# Altium footprint library FootPrintLib_10.PcbLib: 270 footprints (part 7 of 17)
Each footprint in its own frame and in the unit in brackets; x right, y up, seen from the top. Pads: shape width x height; smd on the part's side, far side on the other; paste and mask are expansions set on the pad; w line width, h text height; cw(c..) or ccw(c..) is an arc to the next point about the centre after c.
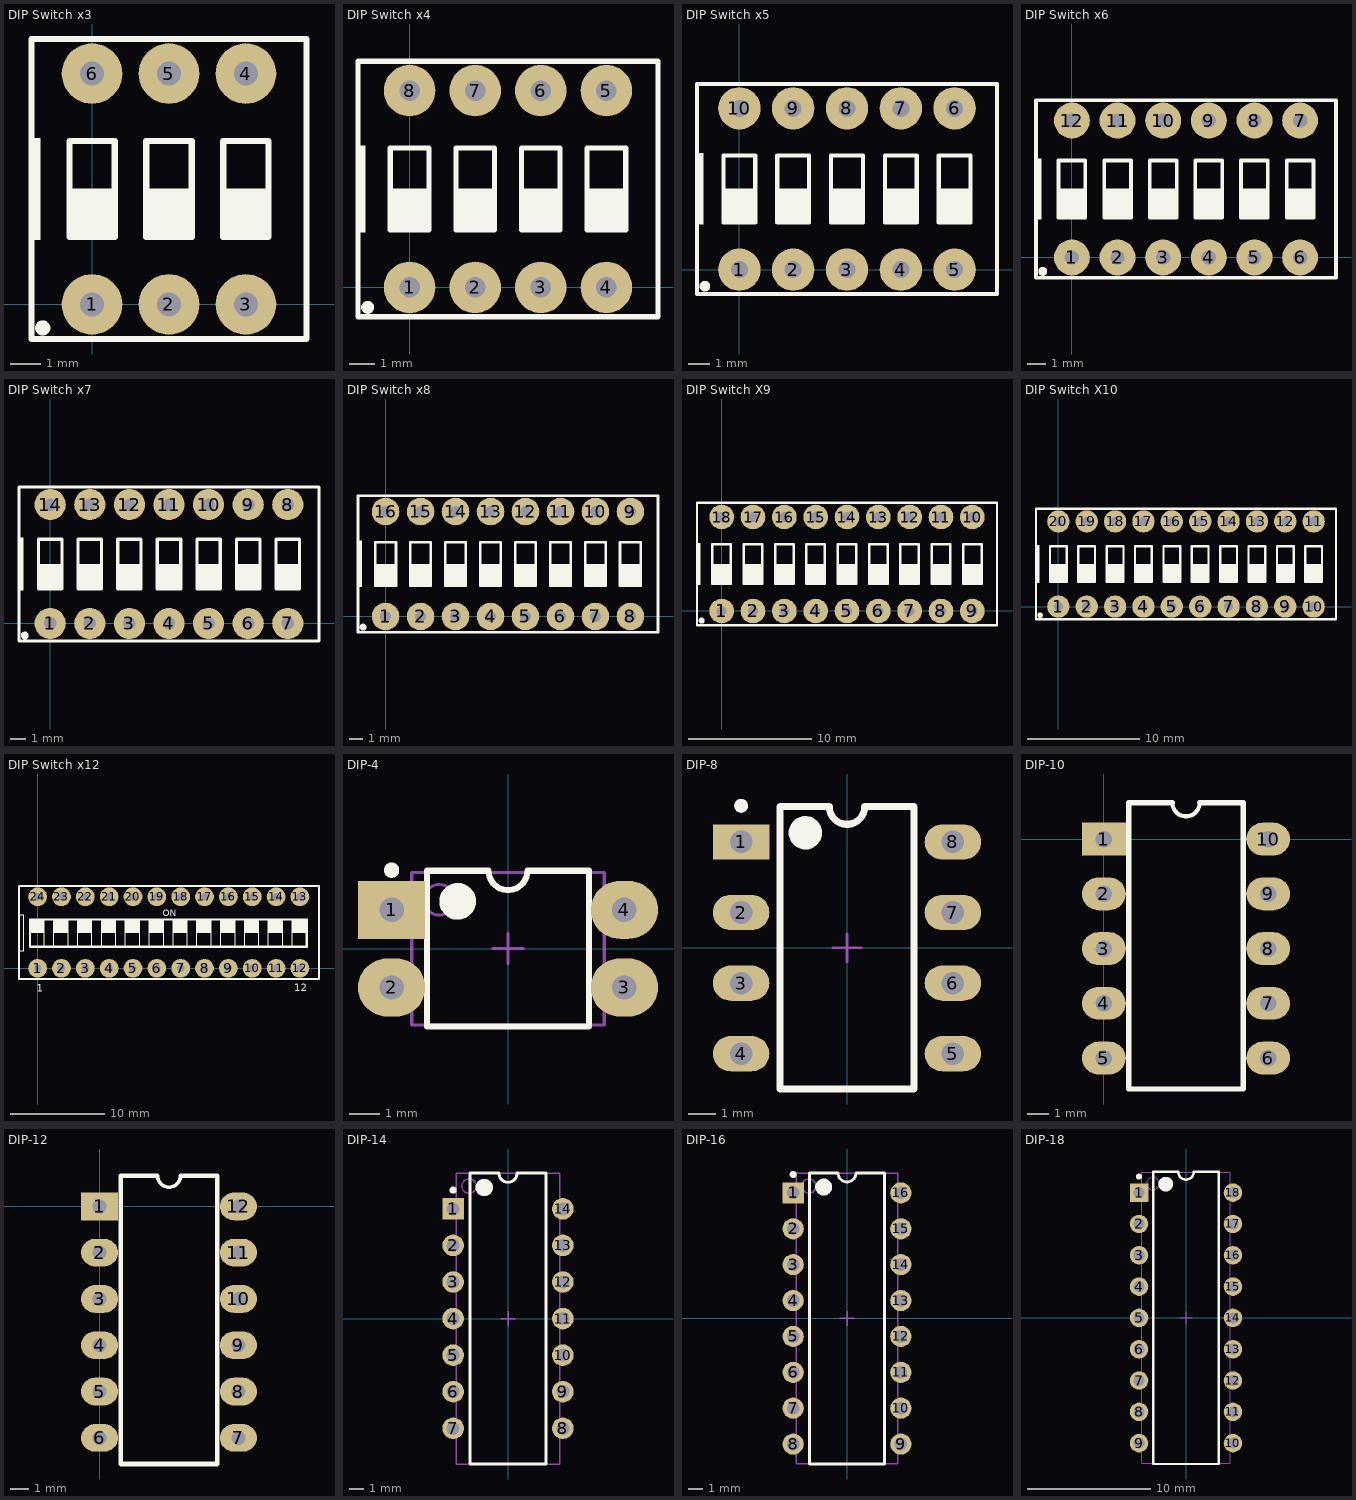
[diagram p6: the footprints below, top view; thin cyan lines are the x and y axes]

## DIP Switch x3 [mm] "Switch DIP 3 way flat slide Thru-Hole"
height 7
pads (6):
  round 2 hole 0.8: 1(0,0) 2(2.54,0) 3(5.08,0) 4(5.08,7.62) 5(2.54,7.62) 6(0,7.62)
Top Overlay:
  circle w0.25: c-1.625,-0.775 r0.125
  rectangle: -0.75,2.225 0.75,3.825
  rectangle: 1.79,2.225 3.29,3.825
  rectangle: 4.33,2.225 5.83,3.825
  rectangle: -2,2.125 -1.7,5.5
  lines w0.2: -2,-1.14 7.08,-1.14 7.08,8.76 -2,8.76 -2,-1.14 ; -0.75,2.225 -0.75,5.395 0.75,5.395 0.75,2.225 -0.75,2.225 ; 1.79,2.225 3.29,2.225 3.29,5.395 1.79,5.395 1.79,2.225 ; 4.33,2.225 5.83,2.225 5.83,5.395 4.33,5.395 4.33,2.225
3D body "User Library-DS1040-03 (DIP_switch).STEP": height 6.8, standoff -3.85, extent -2,-1.14 7.08,8.76

## DIP Switch x4 [mm] "Switch DIP 4 way flat slide Thru-Hole"
height 7
pads (8):
  round 2 hole 0.8: 1(0,0) 2(2.54,0) 3(5.08,0) 4(7.62,0) 5(7.62,7.62) 6(5.08,7.62) 7(2.54,7.62) 8(0,7.62)
Top Overlay:
  circle w0.25: c-1.625,-0.775 r0.125
  rectangle: -0.75,2.225 0.75,3.825
  rectangle: 1.79,2.225 3.29,3.825
  rectangle: 4.33,2.225 5.83,3.825
  rectangle: 6.87,2.225 8.37,3.825
  rectangle: -2,2.125 -1.7,5.5
  lines w0.2: -2,-1.14 9.62,-1.14 9.62,8.76 -2,8.76 -2,-1.14 ; -0.75,2.225 -0.75,5.395 0.75,5.395 0.75,2.225 -0.75,2.225 ; 1.79,2.225 3.29,2.225 3.29,5.395 1.79,5.395 1.79,2.225 ; 4.33,2.225 5.83,2.225 5.83,5.395 4.33,5.395 4.33,2.225 ; 6.87,2.225 8.37,2.225 8.37,5.395 6.87,5.395 6.87,2.225
3D body "User Library-DS1040-04 (DIP_switch).STEP": height 6.8, standoff -3.85, extent -2,-1.14 9.62,8.76

## DIP Switch x5 [mm] "Switch DIP 5 way flat slide Thru-Hole"
height 7
pads (10):
  round 2 hole 0.8: 1(0,0) 2(2.54,0) 3(5.08,0) 4(7.62,0) 5(10.16,0) 6(10.16,7.62) 7(7.62,7.62) 8(5.08,7.62) 9(2.54,7.62) 10(0,7.62)
Top Overlay:
  circle w0.25: c-1.625,-0.775 r0.125
  rectangle: -0.75,2.225 0.75,3.825
  rectangle: 1.79,2.225 3.29,3.825
  rectangle: 4.33,2.225 5.83,3.825
  rectangle: 6.87,2.225 8.37,3.825
  rectangle: 9.41,2.225 10.91,3.825
  rectangle: -2,2.125 -1.7,5.5
  lines w0.2: -2,-1.14 12.16,-1.14 12.16,8.76 -2,8.76 -2,-1.14 ; -0.75,2.225 -0.75,5.395 0.75,5.395 0.75,2.225 -0.75,2.225 ; 1.79,2.225 3.29,2.225 3.29,5.395 1.79,5.395 1.79,2.225 ; 4.33,2.225 5.83,2.225 5.83,5.395 4.33,5.395 4.33,2.225 ; 6.87,2.225 8.37,2.225 8.37,5.395 6.87,5.395 6.87,2.225 ; 9.41,2.225 10.91,2.225 10.91,5.395 9.41,5.395 9.41,2.225
3D body "User Library-DS1040-05 (DIP_switch).STEP": height 6.8, standoff -3.85, extent -2,-1.14 12.16,8.76

## DIP Switch x6 [mm] "Switch DIP 6 way flat slide Thru-Hole"
height 7
pads (12):
  round 2 hole 0.8: 1(0,0) 2(2.54,0) 3(5.08,0) 4(7.62,0) 5(10.16,0) 6(12.7,0) 7(12.7,7.62) 8(10.16,7.62) 9(7.62,7.62) 10(5.08,7.62) 11(2.54,7.62) 12(0,7.62)
Top Overlay:
  circle w0.25: c-1.625,-0.775 r0.125
  rectangle: -0.75,2.225 0.75,3.825
  rectangle: 1.79,2.225 3.29,3.825
  rectangle: 4.33,2.225 5.83,3.825
  rectangle: 6.87,2.225 8.37,3.825
  rectangle: 9.41,2.225 10.91,3.825
  rectangle: 11.95,2.225 13.45,3.825
  rectangle: -2,2.125 -1.7,5.5
  lines w0.2: -2,-1.14 14.7,-1.14 14.7,8.76 -2,8.76 -2,-1.14 ; -0.75,2.225 -0.75,5.395 0.75,5.395 0.75,2.225 -0.75,2.225 ; 1.79,2.225 3.29,2.225 3.29,5.395 1.79,5.395 1.79,2.225 ; 4.33,2.225 5.83,2.225 5.83,5.395 4.33,5.395 4.33,2.225 ; 6.87,2.225 8.37,2.225 8.37,5.395 6.87,5.395 6.87,2.225 ; 9.41,2.225 10.91,2.225 10.91,5.395 9.41,5.395 9.41,2.225 ; 11.95,2.225 13.45,2.225 13.45,5.395 11.95,5.395 11.95,2.225
3D body "User Library-DS1040-06 (DIP_switch).STEP": height 6.8, standoff -3.85, extent -2,-1.14 14.7,8.76

## DIP Switch x7 [mm] "Switch DIP 7 way flat slide Thru-Hole"
height 7
pads (14):
  round 2 hole 0.8: 1(0,0) 2(2.54,0) 3(5.08,0) 4(7.62,0) 5(10.16,0) 6(12.7,0) 7(15.24,0) 8(15.24,7.62) 9(12.7,7.62) 10(10.16,7.62) 11(7.62,7.62) 12(5.08,7.62) 13(2.54,7.62) 14(0,7.62)
Top Overlay:
  circle w0.25: c-1.625,-0.775 r0.125
  rectangle: -0.75,2.225 0.75,3.825
  rectangle: 1.79,2.225 3.29,3.825
  rectangle: 4.33,2.225 5.83,3.825
  rectangle: 6.87,2.225 8.37,3.825
  rectangle: 9.41,2.225 10.91,3.825
  rectangle: 11.95,2.225 13.45,3.825
  rectangle: 14.49,2.225 15.99,3.825
  rectangle: -2,2.125 -1.7,5.5
  lines w0.2: -2,-1.14 17.24,-1.14 17.24,8.76 -2,8.76 -2,-1.14 ; -0.75,2.225 -0.75,5.395 0.75,5.395 0.75,2.225 -0.75,2.225 ; 1.79,2.225 3.29,2.225 3.29,5.395 1.79,5.395 1.79,2.225 ; 4.33,2.225 5.83,2.225 5.83,5.395 4.33,5.395 4.33,2.225 ; 6.87,2.225 8.37,2.225 8.37,5.395 6.87,5.395 6.87,2.225 ; 9.41,2.225 10.91,2.225 10.91,5.395 9.41,5.395 9.41,2.225 ; 11.95,2.225 13.45,2.225 13.45,5.395 11.95,5.395 11.95,2.225 ; 14.49,2.225 15.99,2.225 15.99,5.395 14.49,5.395 14.49,2.225
3D body "User Library-DS1040-07 (DIP_switch).STEP": height 6.8, standoff -3.85, extent -2,-1.14 17.24,8.76

## DIP Switch x8 [mm] "Switch DIP 8 way flat slide Thru-Hole"
height 7
pads (16):
  round 2 hole 0.8: 1(0,0) 2(2.54,0) 3(5.08,0) 4(7.62,0) 5(10.16,0) 6(12.7,0) 7(15.24,0) 8(17.78,0) 9(17.78,7.62) 10(15.24,7.62) 11(12.7,7.62) 12(10.16,7.62) 13(7.62,7.62) 14(5.08,7.62) 15(2.54,7.62) 16(0,7.62)
Top Overlay:
  circle w0.25: c-1.625,-0.775 r0.125
  rectangle: -0.75,2.225 0.75,3.825
  rectangle: 1.79,2.225 3.29,3.825
  rectangle: 4.33,2.225 5.83,3.825
  rectangle: 6.87,2.225 8.37,3.825
  rectangle: 9.41,2.225 10.91,3.825
  rectangle: 11.95,2.225 13.45,3.825
  rectangle: 14.49,2.225 15.99,3.825
  rectangle: 17.03,2.225 18.53,3.825
  rectangle: -2,2.125 -1.7,5.5
  lines w0.2: -2,-1.14 19.78,-1.14 19.78,8.76 -2,8.76 -2,-1.14 ; -0.75,2.225 -0.75,5.395 0.75,5.395 0.75,2.225 -0.75,2.225 ; 1.79,2.225 3.29,2.225 3.29,5.395 1.79,5.395 1.79,2.225 ; 4.33,2.225 5.83,2.225 5.83,5.395 4.33,5.395 4.33,2.225 ; 6.87,2.225 8.37,2.225 8.37,5.395 6.87,5.395 6.87,2.225 ; 9.41,2.225 10.91,2.225 10.91,5.395 9.41,5.395 9.41,2.225 ; 11.95,2.225 13.45,2.225 13.45,5.395 11.95,5.395 11.95,2.225 ; 14.49,2.225 15.99,2.225 15.99,5.395 14.49,5.395 14.49,2.225 ; 17.03,2.225 18.53,2.225 18.53,5.395 17.03,5.395 17.03,2.225
3D body "User Library-DS1040-08 (DIP_switch).STEP": height 6.8, standoff -3.85, extent -2,-1.14 19.78,8.76

## DIP Switch X9 [mm] "Switch DIP 9 way flat slide Thru-Hole"
height 7
pads (18):
  round 2 hole 0.8: 1(0,0) 2(2.54,0) 3(5.08,0) 4(7.62,0) 5(10.16,0) 6(12.7,0) 7(15.24,0) 8(17.78,0) 9(20.32,0) 10(20.32,7.62) 11(17.78,7.62) 12(15.24,7.62) 13(12.7,7.62) 14(10.16,7.62) 15(7.62,7.62) 16(5.08,7.62) 17(2.54,7.62) 18(0,7.62)
Top Overlay:
  circle w0.25: c-1.625,-0.775 r0.125
  rectangle: -2,2.125 -1.7,5.5
  rectangle: 19.57,2.225 21.07,3.825
  rectangle: 17.03,2.225 18.53,3.825
  rectangle: 14.49,2.225 15.99,3.825
  rectangle: 11.95,2.225 13.45,3.825
  rectangle: 9.41,2.225 10.91,3.825
  rectangle: 6.87,2.225 8.37,3.825
  rectangle: 4.33,2.225 5.83,3.825
  rectangle: 1.79,2.225 3.29,3.825
  rectangle: -0.75,2.225 0.75,3.825
  lines w0.2: -2,-1.14 -2,8.76 22.32,8.76 22.32,-1.14 -2,-1.14 ; -0.75,2.225 0.75,2.225 0.75,5.395 -0.75,5.395 -0.75,2.225 ; 1.79,2.225 1.79,5.395 3.29,5.395 3.29,2.225 1.79,2.225 ; 4.33,2.225 4.33,5.395 5.83,5.395 5.83,2.225 4.33,2.225 ; 6.87,2.225 6.87,5.395 8.37,5.395 8.37,2.225 6.87,2.225 ; 9.41,2.225 9.41,5.395 10.91,5.395 10.91,2.225 9.41,2.225 ; 11.95,2.225 11.95,5.395 13.45,5.395 13.45,2.225 11.95,2.225 ; 14.49,2.225 14.49,5.395 15.99,5.395 15.99,2.225 14.49,2.225 ; 17.03,2.225 17.03,5.395 18.53,5.395 18.53,2.225 17.03,2.225 ; 19.57,2.225 19.57,5.395 21.07,5.395 21.07,2.225 19.57,2.225
3D body "User Library-DS1040-09 (DIP_switch).STEP": height 6.8, standoff -3.85, extent -2,-1.14 22.32,8.76

## DIP Switch X10 [mm] "Switch DIP 10 way flat slide Thru-Hole"
height 7
pads (20):
  round 2 hole 0.8: 1(0,0) 2(2.54,0) 3(5.08,0) 4(7.62,0) 5(10.16,0) 6(12.7,0) 7(15.24,0) 8(17.78,0) 9(20.32,0) 10(22.86,0) 11(22.86,7.62) 12(20.32,7.62) 13(17.78,7.62) 14(15.24,7.62) 15(12.7,7.62) 16(10.16,7.62) 17(7.62,7.62) 18(5.08,7.62) 19(2.54,7.62) 20(0,7.62)
Top Overlay:
  circle w0.25: c-1.625,-0.775 r0.125
  rectangle: -2,2.125 -1.7,5.5
  rectangle: 22.11,2.225 23.61,3.825
  rectangle: 19.57,2.225 21.07,3.825
  rectangle: 17.03,2.225 18.53,3.825
  rectangle: 14.49,2.225 15.99,3.825
  rectangle: 11.95,2.225 13.45,3.825
  rectangle: 9.41,2.225 10.91,3.825
  rectangle: 6.87,2.225 8.37,3.825
  rectangle: 4.33,2.225 5.83,3.825
  rectangle: 1.79,2.225 3.29,3.825
  rectangle: -0.75,2.225 0.75,3.825
  lines w0.2: -2,-1.14 -2,8.76 24.86,8.76 24.86,-1.14 -2,-1.14 ; -0.75,2.225 0.75,2.225 0.75,5.395 -0.75,5.395 -0.75,2.225 ; 1.79,2.225 1.79,5.395 3.29,5.395 3.29,2.225 1.79,2.225 ; 4.33,2.225 4.33,5.395 5.83,5.395 5.83,2.225 4.33,2.225 ; 6.87,2.225 6.87,5.395 8.37,5.395 8.37,2.225 6.87,2.225 ; 9.41,2.225 9.41,5.395 10.91,5.395 10.91,2.225 9.41,2.225 ; 11.95,2.225 11.95,5.395 13.45,5.395 13.45,2.225 11.95,2.225 ; 14.49,2.225 14.49,5.395 15.99,5.395 15.99,2.225 14.49,2.225 ; 17.03,2.225 17.03,5.395 18.53,5.395 18.53,2.225 17.03,2.225 ; 19.57,2.225 19.57,5.395 21.07,5.395 21.07,2.225 19.57,2.225 ; 22.11,2.225 22.11,5.395 23.61,5.395 23.61,2.225 22.11,2.225
3D body "User Library-DS1040-10 (DIP_switch).STEP": height 6.8, standoff -3.85, extent -2,-1.14 24.86,8.76

## DIP Switch x12 [mm] "Switch DIP 12 way flat slide Thru-Hole"
pads (24):
  round 2 hole 0.8: 1(0,0) 2(2.54,0) 3(5.08,0) 4(7.62,0) 5(10.16,0) 6(12.7,0) 7(15.24,0) 8(17.78,0) 9(20.32,0) 10(22.86,0) 11(25.4,0) 12(27.94,0) 13(27.94,7.62) 14(25.4,7.62) 15(22.86,7.62) 16(20.32,7.62) 17(17.78,7.62) 18(15.24,7.62) 19(12.7,7.62) 20(10.16,7.62) 21(7.62,7.62) 22(5.08,7.62) 23(2.54,7.62) 24(0,7.62)
Top Overlay:
  region: 28.652,3.752 28.652,5.198 27.128,5.198 27.128,3.752
  region: 26.112,3.752 26.112,5.198 24.588,5.198 24.588,3.752
  region: 23.572,3.752 23.572,5.198 22.048,5.198 22.048,3.752
  region: 21.032,3.752 21.032,5.198 19.508,5.198 19.508,3.752
  region: 18.492,3.752 18.492,5.198 16.968,5.198 16.968,3.752
  region: 15.952,3.752 15.952,5.198 14.428,5.198 14.428,3.752
  region: 13.412,3.752 13.412,5.198 11.888,5.198 11.888,3.752
  region: 10.872,3.752 10.872,5.198 9.348,5.198 9.348,3.752
  region: 8.332,3.752 8.332,5.198 6.808,5.198 6.808,3.752
  region: 5.792,3.752 5.792,5.198 4.268,5.198 4.268,3.752
  region: 3.252,3.752 3.252,5.198 1.728,5.198 1.728,3.752
  region: 0.712,3.752 0.712,5.198 -0.812,5.198 -0.812,3.752
  lines w0.1: -0.812,2.307 -0.812,5.198 ; 0.712,2.307 0.712,5.198 ; 1.728,2.307 1.728,5.198 ; 3.252,2.307 3.252,5.198 ; 4.268,2.307 4.268,5.198 ; 5.792,2.307 5.792,5.198 ; 6.808,2.307 6.808,5.198 ; 8.332,2.307 8.332,5.198 ; 9.348,2.307 9.348,5.198 ; 10.872,2.307 10.872,5.198 ; 11.888,2.307 11.888,5.198 ; 13.412,2.307 13.412,5.198 ; 14.428,2.307 14.428,5.198 ; 15.952,2.307 15.952,5.198 ; 16.968,2.307 16.968,5.198 ; 18.492,2.307 18.492,5.198 ; 19.508,2.307 19.508,5.198 ; 21.032,2.307 21.032,5.198 ; 22.048,2.307 22.048,5.198 ; 23.572,2.307 23.572,5.198 ; 24.588,2.307 24.588,5.198 ; 26.112,2.307 26.112,5.198 ; 27.128,2.307 27.128,5.198
  lines w0.127: -1.981,1.9 -1.473,1.9 -1.473,5.71 -1.981,5.71
  lines w0.2: -1.981,-1.143 -1.981,8.763 29.972,8.763 29.972,-1.143 -1.981,-1.143
  lines w0.254: -0.812,2.307 28.652,2.307 28.652,5.198 -0.812,5.198 -0.812,2.307
  text "ON" at 13.34,5.55 h0.7
  text "12" at 27.36,-2.43 h0.76
  text "1" at -0.08,-2.51 h0.76
Mechanical 1:
  circle w0.025: c17.78,0 r0.254
  circle w0.025: c17.78,7.62 r0.254
  circle w0.025: c15.24,0 r0.254
  circle w0.025: c12.7,0 r0.254
  circle w0.025: c12.7,7.62 r0.254
  circle w0.025: c10.16,7.62 r0.254
  circle w0.025: c10.16,0 r0.254
  circle w0.025: c0,0 r0.254
  circle w0.025: c2.54,-0.01 r0.254
  circle w0.025: c5.08,0 r0.254
  circle w0.025: c7.62,0 r0.254
  circle w0.025: c7.62,7.62 r0.254
  circle w0.025: c5.08,7.62 r0.254
  circle w0.025: c2.54,7.62 r0.254
  circle w0.025: c0,7.62 r0.254
3D body: height 0.76, standoff 0, extent 20.067,7.367 20.573,7.873
3D body: height 0.76, standoff 0, extent 22.607,7.367 23.113,7.873
3D body: height 0.76, standoff 0, extent 25.147,7.367 25.653,7.873
3D body: height 0.76, standoff 0, extent 27.687,7.367 28.193,7.873
3D body: height 0.76, standoff 0, extent 27.687,-0.253 28.193,0.253
3D body: height 0.76, standoff 0, extent 25.147,-0.253 25.653,0.253
3D body: height 0.76, standoff 0, extent 22.607,-0.253 23.113,0.253
3D body: height 0.76, standoff 0, extent 20.067,-0.253 20.573,0.253
3D body: height 0.76, standoff 0, extent 17.527,-0.253 18.033,0.253
3D body: height 0.76, standoff 0, extent 14.987,-0.253 15.493,0.253
3D body: height 0.76, standoff 0, extent 12.447,-0.253 12.953,0.253
3D body: height 0.76, standoff 0, extent 9.907,-0.253 10.413,0.253
3D body: height 0.76, standoff 0, extent 12.447,7.367 12.953,7.873
3D body: height 0.76, standoff 0, extent 17.527,7.367 18.033,7.873
3D body: height 0.76, standoff 0, extent 14.987,7.367 15.493,7.873
3D body: height 6.35, standoff 0.25, extent 27.128,4.487 28.652,5.198
3D body: height 0.76, standoff 0, extent -0.253,7.367 0.253,7.873
3D body: height 0.76, standoff 0, extent 2.287,7.367 2.793,7.873
3D body: height 0.76, standoff 0, extent 4.827,7.367 5.333,7.873
3D body: height 0.76, standoff 0, extent 7.367,7.367 7.873,7.873
3D body: height 0.76, standoff 0, extent -0.253,-0.253 0.253,0.253
3D body: height 0.76, standoff 0, extent 2.287,-0.263 2.793,0.243
3D body: height 0.76, standoff 0, extent 4.827,-0.253 5.333,0.253
3D body: height 0.76, standoff 0, extent 7.367,-0.253 7.873,0.253
3D body: height 3.81, standoff 0, extent -1.981,1.9 -1.473,5.71
3D body: height 5.59, standoff 0, extent -1.981,-1.143 29.972,8.763
3D body: height 0.25, standoff 0.05, extent -1.981,-1.143 29.972,8.763
3D body: height 5.08, standoff 0.25, extent 27.128,2.307 28.652,4.487
3D body: height 5.08, standoff 0.25, extent 22.048,2.307 23.572,4.487
3D body: height 6.35, standoff 0.25, extent 22.048,4.487 23.572,5.198
3D body: height 5.08, standoff 0.25, extent 19.508,2.307 21.032,4.487
3D body: height 6.35, standoff 0.25, extent 19.508,4.487 21.032,5.198
3D body: height 5.59, standoff 0, extent -1.473,2.362 -0.762,5.253
3D body: height 5.59, standoff 0, extent 26.112,2.307 27.128,5.198
3D body: height 5.59, standoff 0, extent 21.032,2.307 22.048,5.198
3D body: height 5.59, standoff 0, extent 23.572,2.307 24.588,5.198
3D body: height 5.08, standoff 0.25, extent 24.588,2.307 26.112,4.487
3D body: height 6.35, standoff 0.25, extent 24.588,4.487 26.112,5.198
3D body: height 6.35, standoff 0.25, extent 16.968,4.487 18.492,5.198
3D body: height 5.08, standoff 0.25, extent 16.968,2.307 18.492,4.487
3D body: height 5.59, standoff 0, extent 18.492,2.307 19.508,5.198
3D body: height 6.35, standoff 0.25, extent 14.428,4.487 15.952,5.198
3D body: height 5.08, standoff 0.25, extent 14.428,2.307 15.952,4.487
3D body: height 5.59, standoff 0, extent 15.952,2.307 16.968,5.198
3D body: height 6.35, standoff 0.25, extent 11.888,4.487 13.412,5.198
3D body: height 5.08, standoff 0.25, extent 11.888,2.307 13.412,4.487
3D body: height 5.59, standoff 0, extent 13.412,2.307 14.428,5.198
3D body: height 6.35, standoff 0.25, extent 9.348,4.487 10.872,5.198
3D body: height 5.08, standoff 0.25, extent 9.348,2.307 10.872,4.487
3D body: height 5.59, standoff 0, extent 10.872,2.307 11.888,5.198
3D body: height 6.35, standoff 0.25, extent 6.808,4.487 8.332,5.198
3D body: height 5.08, standoff 0.25, extent 6.808,2.307 8.332,4.487
3D body: height 5.59, standoff 0, extent 8.332,2.307 9.348,5.198
3D body: height 6.35, standoff 0.25, extent 4.268,4.487 5.792,5.198
3D body: height 5.08, standoff 0.25, extent 4.268,2.307 5.792,4.487
3D body: height 5.59, standoff 0, extent 5.792,2.307 6.808,5.198
3D body: height 6.35, standoff 0.25, extent 1.728,4.487 3.252,5.198
3D body: height 5.08, standoff 0.25, extent 1.728,2.307 3.252,4.487
3D body: height 5.59, standoff 0, extent 3.252,2.307 4.268,5.198
3D body: height 6.35, standoff 0.25, extent -0.812,4.487 0.712,5.198
3D body: height 5.08, standoff 0.25, extent -0.812,2.307 0.712,4.487
3D body: height 5.59, standoff 0, extent 0.712,2.307 1.728,5.198
3D body: height 5.59, standoff 0.25, extent -0.956,6.005 0.662,7.579
3D body: height 5.59, standoff 0.03, extent -0.554,6.09 0.254,7.507
3D body: height 5.59, standoff 0.25, extent 0.799,6.015 2.365,7.567

## DIP-4 [mm] "DIP; 4 Leads; Row Spacing 7.62 mm; Pitch 2.54 mm"
height 5.6
pads (4):
  rect 2.2x1.9 hole 0.8: 1(-3.81,1.27)
  oval 2.2x1.9 hole 0.8: 2(-3.81,-1.27) 3(3.81,-1.27) 4(3.81,1.27)
Top Overlay:
  circle w0.6: c-1.65,1.55 r0.3
  circle w0.25: c-3.81,2.57 r0.125
  lines w0.2: -2.65,-2.55 2.65,-2.55 2.65,2.55 0.635,2.55 cw(c0,2.55) -0.635,2.55 -2.65,2.55 -2.65,-2.55
Mechanical 13:
  circle w0.1: c-2.25,1.6 r0.5
  lines w0.1: -3.15,-2.5 3.15,-2.5 3.15,2.5 -3.15,2.5 -3.15,-2.5
Mechanical 15:
  lines w0.1: -0.5,0 0.5,0 ; 0,-0.5 0,0.5
3D body "User Library-DIP4.STEP": height 3.85, standoff -2.45, extent -3.935,-2.297 3.935,2.297

## DIP-8 [mil] "DIP8·â×°£¬100mil¼ä¾à£¬300milÒý½Å¿í¶È"
height 100
pads (8):
  rect 80x50 hole 32: 1(-150,150)
  oval 80x50 hole 32: 2(-150,50) 3(-150,-50) 4(-150,-150) 5(150,-150) 6(150,-50) 7(150,50) 8(150,150)
Top Overlay:
  circle w9.84: c-150,201.18 r4.92
  circle w23.62: c-59,163 r11.81
  lines w10: -95,-200 95,-200 95,200 25,200 cw(c0,200) -25,200 -95,200 -95,-200
Mechanical 15:
  lines w3.94: -19.68,0 19.68,0 ; 0,-19.68 0,19.68
3D body "User Library-DIP-8-300-metric.step": height 177.17, standoff -137.8, extent -153,-212.6 152.53,212.6

## DIP-10 [mil]
pads (10):
  rect 80x60 hole 30: 1(0,0)
  oval 80x60 hole 30: 2(0,-100) 3(0,-200) 4(0,-300) 5(0,-400) 6(300,-400) 7(300,-300) 8(300,-200) 9(300,-100) 10(300,0)
Top Overlay:
  lines w7.87: 125,66.53 ccw(c150,66.53) 175,66.53
  lines w10: 125,66.54 45.67,66.54 45.67,-456.53 254.33,-456.53 254.33,66.54 175,66.54

## DIP-12 [mil]
pads (12):
  rect 80x60 hole 30: 1(0,0)
  oval 80x60 hole 30: 2(0,-100) 3(0,-200) 4(0,-300) 5(0,-400) 6(0,-500) 7(300,-500) 8(300,-400) 9(300,-300) 10(300,-200) 11(300,-100) 12(300,0)
Top Overlay:
  lines w7.87: 125,66.53 ccw(c150,66.53) 175,66.53
  lines w10: 125,66.54 45.67,66.54 45.67,-556.53 254.33,-556.53 254.33,66.54 175,66.54

## DIP-14 [mm] "DIP; 14 Leads; Row Spacing 7.62 mm; Pitch 2.54 mm"
height 5.08
pads (14):
  rect 1.5x1.5 hole 0.9: 1(-3.81,7.62)
  round 1.5 hole 0.9: 2(-3.81,5.08) 3(-3.81,2.54) 4(-3.81,0) 5(-3.81,-2.54) 6(-3.81,-5.08) 7(-3.81,-7.62) 8(3.81,-7.62) 9(3.81,-5.08) 10(3.81,-2.54) 11(3.81,0) 12(3.81,2.54) 13(3.81,5.08) 14(3.81,7.62)
Top Overlay:
  circle w0.6: c-1.65,9.1 r0.3
  circle w0.25: c-3.81,8.92 r0.125
  lines w0.2: -2.65,-10.1 2.65,-10.1 2.65,10.1 0.635,10.1 cw(c0,10.1) -0.635,10.1 -2.65,10.1 -2.65,-10.1
Mechanical 13:
  circle w0.1: c-2.7,9.2 r0.5
  lines w0.1: -3.6,-10.1 3.6,-10.1 3.6,10.1 -3.6,10.1 -3.6,-10.1
Mechanical 15:
  lines w0.1: -0.5,0 0.5,0 ; 0,-0.5 0,0.5
3D body: height 5.08, standoff 0, extent -3.6,-10.1 3.6,10.1

## DIP-16 [mm] "DIP; 16 Leads; Row Spacing 7.62 mm; Pitch 2.54 mm"
height 5.08
pads (16):
  rect 1.5x1.5 hole 0.9: 1(-3.81,8.89)
  round 1.5 hole 0.9: 2(-3.81,6.35) 3(-3.81,3.81) 4(-3.81,1.27) 5(-3.81,-1.27) 6(-3.81,-3.81) 7(-3.81,-6.35) 8(-3.81,-8.89) 9(3.81,-8.89) 10(3.81,-6.35) 11(3.81,-3.81) 12(3.81,-1.27) 13(3.81,1.27) 14(3.81,3.81) 15(3.81,6.35) 16(3.81,8.89)
Top Overlay:
  circle w0.25: c-3.81,10.19 r0.125
  circle w0.6: c-1.65,9.3 r0.3
  lines w0.2: -2.65,-10.3 -2.65,10.3 -0.635,10.3 ccw(c0,10.3) 0.635,10.3 2.65,10.3 2.65,-10.3 -2.65,-10.3
Mechanical 13:
  circle w0.1: c-2.7,9.375 r0.5
  lines w0.1: -3.6,-10.275 -3.6,10.275 3.6,10.275 3.6,-10.275 -3.6,-10.275
Mechanical 15:
  lines w0.1: -0.5,0 0.5,0 ; 0,-0.5 0,0.5
3D body: height 5.08, standoff 0, extent -3.6,-10.275 3.6,10.275

## DIP-18 [mm] "DIP; 18 Leads; Row Spacing 7.62 mm; Pitch 2.54 mm"
height 5.08
pads (18):
  rect 1.5x1.5 hole 0.9: 1(-3.81,10.16)
  round 1.5 hole 0.9: 2(-3.81,7.62) 3(-3.81,5.08) 4(-3.81,2.54) 5(-3.81,0) 6(-3.81,-2.54) 7(-3.81,-5.08) 8(-3.81,-7.62) 9(-3.81,-10.16) 10(3.81,-10.16) 11(3.81,-7.62) 12(3.81,-5.08) 13(3.81,-2.54) 14(3.81,0) 15(3.81,2.54) 16(3.81,5.08) 17(3.81,7.62) 18(3.81,10.16)
Top Overlay:
  circle w0.25: c-3.81,11.46 r0.125
  circle w0.6: c-1.65,10.85 r0.3
  lines w0.2: -2.65,-11.85 -2.65,11.85 -0.635,11.85 ccw(c0,11.85) 0.635,11.85 2.65,11.85 2.65,-11.85 -2.65,-11.85
Mechanical 13:
  circle w0.1: c-2.7,10.9 r0.5
  lines w0.1: -3.6,-11.8 -3.6,11.8 3.6,11.8 3.6,-11.8 -3.6,-11.8
Mechanical 15:
  lines w0.1: -0.5,0 0.5,0 ; 0,-0.5 0,0.5
3D body: height 5.08, standoff 0, extent -3.6,-11.8 3.6,11.8